# Altium footprint library Connector Header 254.PcbLib: 156 footprints (part 11 of 11)
Each footprint in its own frame and in the unit in brackets; x right, y up, seen from the top. Pads: shape width x height; smd on the part's side, far side on the other; paste and mask are expansions set on the pad; w line width, h text height; cw(c..) or ccw(c..) is an arc to the next point about the centre after c.
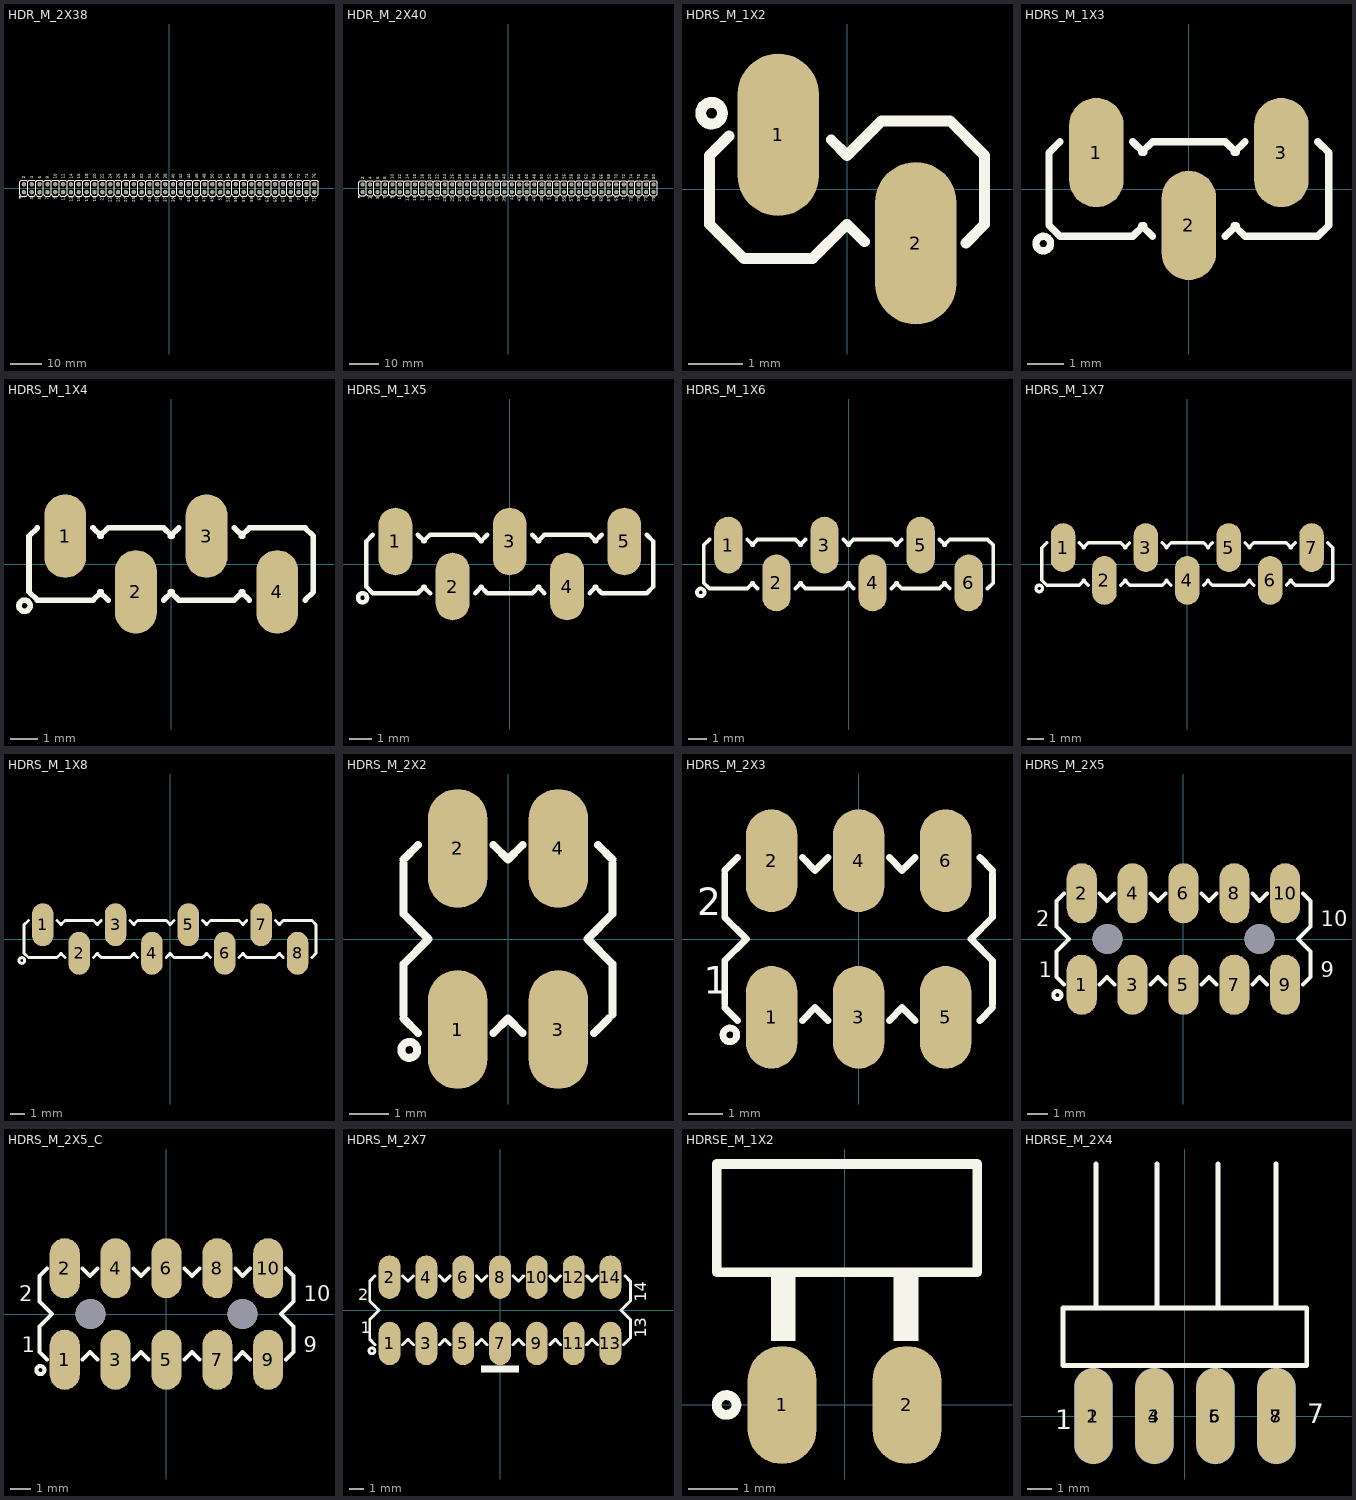
[diagram p10: the footprints below, top view; thin cyan lines are the x and y axes]

## HDR_M_2X38 [mm] "Male Header 2X38 with 2.54 mm Pitch"
pads (76):
  round 1.4 / inner round 1.4 / far side oval 1.4x2.2 hole 1: 1(-46.99,-1.27) 2(-46.99,1.27) 3(-44.45,-1.27) 4(-44.45,1.27) 5(-41.91,-1.27) 6(-41.91,1.27) 7(-39.37,-1.27) 8(-39.37,1.27) 9(-36.83,-1.27) 10(-36.83,1.27) 11(-34.29,-1.27) 12(-34.29,1.27) 13(-31.75,-1.27) 14(-31.75,1.27) 15(-29.21,-1.27) 16(-29.21,1.27) 17(-26.67,-1.27) 18(-26.67,1.27) 19(-24.13,-1.27) 20(-24.13,1.27) 21(-21.59,-1.27) 22(-21.59,1.27) 23(-19.05,-1.27) 24(-19.05,1.27) 25(-16.51,-1.27) 26(-16.51,1.27) 27(-13.97,-1.27) 28(-13.97,1.27) 29(-11.43,-1.27) 30(-11.43,1.27) 31(-8.89,-1.27) 32(-8.89,1.27) 33(-6.35,-1.27) 34(-6.35,1.27) 35(-3.81,-1.27) 36(-3.81,1.27) 37(-1.27,-1.27) 38(-1.27,1.27) 39(1.27,-1.27) 40(1.27,1.27) 41(3.81,-1.27) 42(3.81,1.27) 43(6.35,-1.27) 44(6.35,1.27) 45(8.89,-1.27) 46(8.89,1.27) 47(11.43,-1.27) 48(11.43,1.27) 49(13.97,-1.27) 50(13.97,1.27) 51(16.51,-1.27) 52(16.51,1.27) 53(19.05,-1.27) 54(19.05,1.27) 55(21.59,-1.27) 56(21.59,1.27) 57(24.13,-1.27) 58(24.13,1.27) 59(26.67,-1.27) 60(26.67,1.27) 61(29.21,-1.27) 62(29.21,1.27) 63(31.75,-1.27) 64(31.75,1.27) 65(34.29,-1.27) 66(34.29,1.27) 67(36.83,-1.27) 68(36.83,1.27) 69(39.37,-1.27) 70(39.37,1.27) 71(41.91,-1.27) 72(41.91,1.27) 73(44.45,-1.27) 74(44.45,1.27) 75(46.99,-1.27) 76(46.99,1.27)
TopOverlay:
  drawing of 268 lines, arcs and shapes, not listed
  text "1" at -46.482,-3.253 h1
  text "2" at -46.482,3.048 h1
  text "2" at -46.482,3.048 h1
  text "1" at -46.482,-3.253 h1
  text "4" at -43.942,3.048 h1
  text "3" at -43.942,-3.682 h1
  text "6" at -41.402,3.048 h1
  text "5" at -41.402,-3.682 h1
  text "8" at -38.862,3.048 h1
  text "7" at -38.862,-3.682 h1
  text "10" at -36.322,3.048 h1
  text "9" at -36.322,-3.634 h1
  text "12" at -33.782,3.048 h1
  text "11" at -33.782,-3.986 h1
  text "14" at -31.242,3.048 h1
  text "13" at -31.242,-4.415 h1
  text "16" at -28.702,3.048 h1
  text "15" at -28.702,-4.415 h1
  text "18" at -26.162,3.048 h1
  text "17" at -26.162,-4.415 h1
  text "20" at -23.622,3.048 h1
  text "19" at -23.622,-4.367 h1
  text "22" at -21.082,3.048 h1
  text "21" at -21.082,-4.144 h1
  text "24" at -18.542,3.048 h1
  text "23" at -18.542,-4.572 h1
  text "26" at -16.002,3.048 h1
  text "25" at -16.002,-4.572 h1
  text "28" at -13.462,3.048 h1
  text "27" at -13.462,-4.572 h1
  text "30" at -10.922,3.048 h1
  text "29" at -10.922,-4.524 h1
  text "32" at -8.382,3.048 h1
  text "31" at -8.382,-4.144 h1
  text "34" at -5.842,3.048 h1
  text "33" at -5.842,-4.572 h1
  text "36" at -3.302,3.048 h1
  text "35" at -3.302,-4.572 h1
  text "38" at -0.762,3.048 h1
  text "37" at -0.762,-4.572 h1
  text "40" at 1.778,3.048 h1
  text "39" at 1.778,-4.524 h1
  text "42" at 4.318,3.048 h1
  text "41" at 4.318,-4.144 h1
  text "44" at 6.858,3.048 h1
  text "43" at 6.858,-4.572 h1
  text "46" at 9.398,3.048 h1
  text "45" at 9.398,-4.572 h1
  text "48" at 11.938,3.048 h1
  text "47" at 11.938,-4.572 h1
  text "50" at 14.478,3.048 h1
  text "49" at 14.478,-4.524 h1
  text "52" at 17.018,3.048 h1
  text "51" at 17.018,-4.144 h1
  text "54" at 19.558,3.048 h1
  text "53" at 19.558,-4.572 h1
  text "56" at 22.098,3.048 h1
  text "55" at 22.098,-4.572 h1
  text "58" at 24.638,3.048 h1
  text "57" at 24.638,-4.572 h1
  text "60" at 27.178,3.048 h1
  text "59" at 27.178,-4.524 h1
  text "62" at 29.718,3.048 h1
  text "61" at 29.718,-4.091 h1
  text "64" at 32.258,3.048 h1
  text "63" at 32.258,-4.52 h1
  text "66" at 34.798,3.048 h1
  text "65" at 34.798,-4.52 h1
  text "68" at 37.338,3.048 h1
  text "67" at 37.338,-4.52 h1
  text "70" at 39.878,3.048 h1
  text "69" at 39.878,-4.472 h1
  text "72" at 42.418,3.048 h1
  text "71" at 42.418,-4.144 h1
  text "74" at 44.958,3.048 h1
  text "73" at 44.958,-4.572 h1
  text "76" at 47.498,3.048 h1
  text "75" at 47.498,-4.572 h1
3D body "PIN.STEP": height 8.43, standoff -2.49, extent -48.26,-2.54 -45.72,0
3D body "PIN_mid.STEP": height 8.43, standoff -2.49, extent -43.18,0 -40.64,2.54
3D body "PIN_mid.STEP": height 8.43, standoff -2.49, extent -40.64,0 -38.1,2.54
3D body "PIN_mid.STEP": height 8.43, standoff -2.49, extent -38.1,0 -35.56,2.54
3D body "PIN_mid.STEP": height 8.43, standoff -2.49, extent -35.56,0 -33.02,2.54
3D body "PIN_mid.STEP": height 8.43, standoff -2.49, extent -33.02,0 -30.48,2.54
3D body "PIN_mid.STEP": height 8.43, standoff -2.49, extent -30.48,0 -27.94,2.54
3D body "PIN_mid.STEP": height 8.43, standoff -2.49, extent -27.94,0 -25.4,2.54
3D body "PIN_mid.STEP": height 8.43, standoff -2.49, extent -25.4,0 -22.86,2.54
3D body "PIN_mid.STEP": height 8.43, standoff -2.49, extent -22.86,0 -20.32,2.54
3D body "PIN_mid.STEP": height 8.43, standoff -2.49, extent -20.32,0 -17.78,2.54
3D body "PIN_mid.STEP": height 8.43, standoff -2.49, extent -17.78,0 -15.24,2.54
3D body "PIN_mid.STEP": height 8.43, standoff -2.49, extent -15.24,0 -12.7,2.54
3D body "PIN_mid.STEP": height 8.43, standoff -2.49, extent -12.7,0 -10.16,2.54
3D body "PIN_mid.STEP": height 8.43, standoff -2.49, extent -10.16,0 -7.62,2.54
3D body "PIN_mid.STEP": height 8.43, standoff -2.49, extent -7.62,0 -5.08,2.54
3D body "PIN_mid.STEP": height 8.43, standoff -2.49, extent -5.08,0 -2.54,2.54
3D body "PIN_mid.STEP": height 8.43, standoff -2.49, extent -2.54,0 0,2.54
3D body "PIN_mid.STEP": height 8.43, standoff -2.49, extent 0,0 2.54,2.54
3D body "PIN_mid.STEP": height 8.43, standoff -2.49, extent 2.54,0 5.08,2.54
3D body "PIN_mid.STEP": height 8.43, standoff -2.49, extent 5.08,0 7.62,2.54
3D body "PIN_mid.STEP": height 8.43, standoff -2.49, extent 7.62,0 10.16,2.54
3D body "PIN_mid.STEP": height 8.43, standoff -2.49, extent 10.16,0 12.7,2.54
3D body "PIN_mid.STEP": height 8.43, standoff -2.49, extent 12.7,0 15.24,2.54
3D body "PIN_mid.STEP": height 8.43, standoff -2.49, extent 15.24,0 17.78,2.54
3D body "PIN_mid.STEP": height 8.43, standoff -2.49, extent 17.78,0 20.32,2.54
3D body "PIN_mid.STEP": height 8.43, standoff -2.49, extent 20.32,0 22.86,2.54
3D body "PIN_mid.STEP": height 8.43, standoff -2.49, extent 22.86,0 25.4,2.54
3D body "PIN_mid.STEP": height 8.43, standoff -2.49, extent 25.4,0 27.94,2.54
3D body "PIN_mid.STEP": height 8.43, standoff -2.49, extent 27.94,0 30.48,2.54
3D body "PIN_mid.STEP": height 8.43, standoff -2.49, extent 30.48,0 33.02,2.54
3D body "PIN_mid.STEP": height 8.43, standoff -2.49, extent 33.02,0 35.56,2.54
3D body "PIN_mid.STEP": height 8.43, standoff -2.49, extent 35.56,0 38.1,2.54
3D body "PIN_mid.STEP": height 8.43, standoff -2.49, extent 38.1,0 40.64,2.54
3D body "PIN_mid.STEP": height 8.43, standoff -2.49, extent 40.64,0 43.18,2.54
3D body "PIN_mid.STEP": height 8.43, standoff -2.49, extent 43.18,0 45.72,2.54
3D body "PIN_mid.STEP": height 8.43, standoff -2.49, extent -45.72,0 -43.18,2.54
3D body "PIN_mid.STEP": height 8.43, standoff -2.49, extent -45.72,-2.54 -43.18,0
3D body "PIN_mid.STEP": height 8.43, standoff -2.49, extent -43.18,-2.54 -40.64,0
3D body "PIN_mid.STEP": height 8.43, standoff -2.49, extent -40.64,-2.54 -38.1,0
3D body "PIN_mid.STEP": height 8.43, standoff -2.49, extent -38.1,-2.54 -35.56,0
3D body "PIN_mid.STEP": height 8.43, standoff -2.49, extent -35.56,-2.54 -33.02,0
3D body "PIN_mid.STEP": height 8.43, standoff -2.49, extent -33.02,-2.54 -30.48,0
3D body "PIN_mid.STEP": height 8.43, standoff -2.49, extent -30.48,-2.54 -27.94,0
3D body "PIN_mid.STEP": height 8.43, standoff -2.49, extent -27.94,-2.54 -25.4,0
3D body "PIN_mid.STEP": height 8.43, standoff -2.49, extent -25.4,-2.54 -22.86,0
3D body "PIN_mid.STEP": height 8.43, standoff -2.49, extent -22.86,-2.54 -20.32,0
3D body "PIN_mid.STEP": height 8.43, standoff -2.49, extent -20.32,-2.54 -17.78,0
3D body "PIN_mid.STEP": height 8.43, standoff -2.49, extent -17.78,-2.54 -15.24,0
3D body "PIN_mid.STEP": height 8.43, standoff -2.49, extent -15.24,-2.54 -12.7,0
3D body "PIN_mid.STEP": height 8.43, standoff -2.49, extent -12.7,-2.54 -10.16,0
3D body "PIN_mid.STEP": height 8.43, standoff -2.49, extent -10.16,-2.54 -7.62,0
3D body "PIN_mid.STEP": height 8.43, standoff -2.49, extent -7.62,-2.54 -5.08,0
3D body "PIN_mid.STEP": height 8.43, standoff -2.49, extent -5.08,-2.54 -2.54,0
3D body "PIN_mid.STEP": height 8.43, standoff -2.49, extent -2.54,-2.54 0,0
3D body "PIN_mid.STEP": height 8.43, standoff -2.49, extent 0,-2.54 2.54,0
3D body "PIN_mid.STEP": height 8.43, standoff -2.49, extent 2.54,-2.54 5.08,0
3D body "PIN_mid.STEP": height 8.43, standoff -2.49, extent 5.08,-2.54 7.62,0
3D body "PIN_mid.STEP": height 8.43, standoff -2.49, extent 7.62,-2.54 10.16,0
3D body "PIN_mid.STEP": height 8.43, standoff -2.49, extent 10.16,-2.54 12.7,0
3D body "PIN_mid.STEP": height 8.43, standoff -2.49, extent 12.7,-2.54 15.24,0
3D body "PIN_mid.STEP": height 8.43, standoff -2.49, extent 15.24,-2.54 17.78,0
3D body "PIN_mid.STEP": height 8.43, standoff -2.49, extent 17.78,-2.54 20.32,0
3D body "PIN_mid.STEP": height 8.43, standoff -2.49, extent 20.32,-2.54 22.86,0
3D body "PIN_mid.STEP": height 8.43, standoff -2.49, extent 22.86,-2.54 25.4,0
3D body "PIN_mid.STEP": height 8.43, standoff -2.49, extent 25.4,-2.54 27.94,0
3D body "PIN_mid.STEP": height 8.43, standoff -2.49, extent 27.94,-2.54 30.48,0
3D body "PIN_mid.STEP": height 8.43, standoff -2.49, extent 30.48,-2.54 33.02,0
3D body "PIN_mid.STEP": height 8.43, standoff -2.49, extent 33.02,-2.54 35.56,0
3D body "PIN_mid.STEP": height 8.43, standoff -2.49, extent 35.56,-2.54 38.1,0
3D body "PIN_mid.STEP": height 8.43, standoff -2.49, extent 38.1,-2.54 40.64,0
3D body "PIN_mid.STEP": height 8.43, standoff -2.49, extent 40.64,-2.54 43.18,0
3D body "PIN_mid.STEP": height 8.43, standoff -2.49, extent 43.18,-2.54 45.72,0
3D body "PIN.STEP": height 8.43, standoff -2.49, extent -48.26,0 -45.72,2.54
3D body "PIN.STEP": height 8.43, standoff -2.49, extent 45.72,0 48.26,2.54
3D body "PIN.STEP": height 8.43, standoff -2.49, extent 45.72,-2.54 48.26,0

## HDR_M_2X40 [mm] "Male Header 2X40 with 2.54 mm Pitch"
pads (80):
  round 1.4 / inner round 1.4 / far side oval 1.4x2.2 hole 1: 1(-49.53,-1.27) 2(-49.53,1.27) 3(-46.99,-1.27) 4(-46.99,1.27) 5(-44.45,-1.27) 6(-44.45,1.27) 7(-41.91,-1.27) 8(-41.91,1.27) 9(-39.37,-1.27) 10(-39.37,1.27) 11(-36.83,-1.27) 12(-36.83,1.27) 13(-34.29,-1.27) 14(-34.29,1.27) 15(-31.75,-1.27) 16(-31.75,1.27) 17(-29.21,-1.27) 18(-29.21,1.27) 19(-26.67,-1.27) 20(-26.67,1.27) 21(-24.13,-1.27) 22(-24.13,1.27) 23(-21.59,-1.27) 24(-21.59,1.27) 25(-19.05,-1.27) 26(-19.05,1.27) 27(-16.51,-1.27) 28(-16.51,1.27) 29(-13.97,-1.27) 30(-13.97,1.27) 31(-11.43,-1.27) 32(-11.43,1.27) 33(-8.89,-1.27) 34(-8.89,1.27) 35(-6.35,-1.27) 36(-6.35,1.27) 37(-3.81,-1.27) 38(-3.81,1.27) 39(-1.27,-1.27) 40(-1.27,1.27) 41(1.27,-1.27) 42(1.27,1.27) 43(3.81,-1.27) 44(3.81,1.27) 45(6.35,-1.27) 46(6.35,1.27) 47(8.89,-1.27) 48(8.89,1.27) 49(11.43,-1.27) 50(11.43,1.27) 51(13.97,-1.27) 52(13.97,1.27) 53(16.51,-1.27) 54(16.51,1.27) 55(19.05,-1.27) 56(19.05,1.27) 57(21.59,-1.27) 58(21.59,1.27) 59(24.13,-1.27) 60(24.13,1.27) 61(26.67,-1.27) 62(26.67,1.27) 63(29.21,-1.27) 64(29.21,1.27) 65(31.75,-1.27) 66(31.75,1.27) 67(34.29,-1.27) 68(34.29,1.27) 69(36.83,-1.27) 70(36.83,1.27) 71(39.37,-1.27) 72(39.37,1.27) 73(41.91,-1.27) 74(41.91,1.27) 75(44.45,-1.27) 76(44.45,1.27) 77(46.99,-1.27) 78(46.99,1.27) 79(49.53,-1.27) 80(49.53,1.27)
TopOverlay:
  drawing of 282 lines, arcs and shapes, not listed
  text "1" at -49.022,-3.253 h1
  text "2" at -49.022,3.048 h1
  text "2" at -49.022,3.048 h1
  text "1" at -49.022,-3.253 h1
  text "4" at -46.482,3.048 h1
  text "3" at -46.482,-3.682 h1
  text "6" at -43.942,3.048 h1
  text "5" at -43.942,-3.682 h1
  text "8" at -41.402,3.048 h1
  text "7" at -41.402,-3.682 h1
  text "10" at -38.862,3.048 h1
  text "9" at -38.862,-3.634 h1
  text "12" at -36.322,3.048 h1
  text "11" at -36.322,-3.986 h1
  text "14" at -33.782,3.048 h1
  text "13" at -33.782,-4.415 h1
  text "16" at -31.242,3.048 h1
  text "15" at -31.242,-4.415 h1
  text "18" at -28.702,3.048 h1
  text "17" at -28.702,-4.415 h1
  text "20" at -26.162,3.048 h1
  text "19" at -26.162,-4.367 h1
  text "22" at -23.622,3.048 h1
  text "21" at -23.622,-4.144 h1
  text "24" at -21.082,3.048 h1
  text "23" at -21.082,-4.572 h1
  text "26" at -18.542,3.048 h1
  text "25" at -18.542,-4.572 h1
  text "28" at -16.002,3.048 h1
  text "27" at -16.002,-4.572 h1
  text "30" at -13.462,3.048 h1
  text "29" at -13.462,-4.524 h1
  text "32" at -10.922,3.048 h1
  text "31" at -10.922,-4.144 h1
  text "34" at -8.382,3.048 h1
  text "33" at -8.382,-4.572 h1
  text "36" at -5.842,3.048 h1
  text "35" at -5.842,-4.572 h1
  text "38" at -3.302,3.048 h1
  text "37" at -3.302,-4.572 h1
  text "40" at -0.762,3.048 h1
  text "39" at -0.762,-4.524 h1
  text "42" at 1.778,3.048 h1
  text "41" at 1.778,-4.144 h1
  text "44" at 4.318,3.048 h1
  text "43" at 4.318,-4.572 h1
  text "46" at 6.858,3.048 h1
  text "45" at 6.858,-4.572 h1
  text "48" at 9.398,3.048 h1
  text "47" at 9.398,-4.572 h1
  text "50" at 11.938,3.048 h1
  text "49" at 11.938,-4.524 h1
  text "52" at 14.478,3.048 h1
  text "51" at 14.478,-4.144 h1
  text "54" at 17.018,3.048 h1
  text "53" at 17.018,-4.572 h1
  text "56" at 19.558,3.048 h1
  text "55" at 19.558,-4.572 h1
  text "58" at 22.098,3.048 h1
  text "57" at 22.098,-4.572 h1
  text "60" at 24.638,3.048 h1
  text "59" at 24.638,-4.524 h1
  text "62" at 27.178,3.048 h1
  text "61" at 27.178,-4.091 h1
  text "64" at 29.718,3.048 h1
  text "63" at 29.718,-4.52 h1
  text "66" at 32.258,3.048 h1
  text "65" at 32.258,-4.52 h1
  text "68" at 34.798,3.048 h1
  text "67" at 34.798,-4.52 h1
  text "70" at 37.338,3.048 h1
  text "69" at 37.338,-4.472 h1
  text "72" at 39.878,3.048 h1
  text "71" at 39.878,-4.144 h1
  text "74" at 42.418,3.048 h1
  text "73" at 42.418,-4.572 h1
  text "76" at 44.958,3.048 h1
  text "75" at 44.958,-4.572 h1
  text "78" at 47.498,3.048 h1
  text "77" at 47.498,-4.572 h1
  text "80" at 50.038,3.048 h1
  text "79" at 50.038,-4.524 h1
3D body "PIN.STEP": height 8.43, standoff -2.49, extent -50.8,-2.54 -48.26,0
3D body "PIN_mid.STEP": height 8.43, standoff -2.49, extent -45.72,0 -43.18,2.54
3D body "PIN_mid.STEP": height 8.43, standoff -2.49, extent -43.18,0 -40.64,2.54
3D body "PIN_mid.STEP": height 8.43, standoff -2.49, extent -40.64,0 -38.1,2.54
3D body "PIN_mid.STEP": height 8.43, standoff -2.49, extent -38.1,0 -35.56,2.54
3D body "PIN_mid.STEP": height 8.43, standoff -2.49, extent -35.56,0 -33.02,2.54
3D body "PIN_mid.STEP": height 8.43, standoff -2.49, extent -33.02,0 -30.48,2.54
3D body "PIN_mid.STEP": height 8.43, standoff -2.49, extent -30.48,0 -27.94,2.54
3D body "PIN_mid.STEP": height 8.43, standoff -2.49, extent -27.94,0 -25.4,2.54
3D body "PIN_mid.STEP": height 8.43, standoff -2.49, extent -25.4,0 -22.86,2.54
3D body "PIN_mid.STEP": height 8.43, standoff -2.49, extent -22.86,0 -20.32,2.54
3D body "PIN_mid.STEP": height 8.43, standoff -2.49, extent -20.32,0 -17.78,2.54
3D body "PIN_mid.STEP": height 8.43, standoff -2.49, extent -17.78,0 -15.24,2.54
3D body "PIN_mid.STEP": height 8.43, standoff -2.49, extent -15.24,0 -12.7,2.54
3D body "PIN_mid.STEP": height 8.43, standoff -2.49, extent -12.7,0 -10.16,2.54
3D body "PIN_mid.STEP": height 8.43, standoff -2.49, extent -10.16,0 -7.62,2.54
3D body "PIN_mid.STEP": height 8.43, standoff -2.49, extent -7.62,0 -5.08,2.54
3D body "PIN_mid.STEP": height 8.43, standoff -2.49, extent -5.08,0 -2.54,2.54
3D body "PIN_mid.STEP": height 8.43, standoff -2.49, extent -2.54,0 0,2.54
3D body "PIN_mid.STEP": height 8.43, standoff -2.49, extent 0,0 2.54,2.54
3D body "PIN_mid.STEP": height 8.43, standoff -2.49, extent 2.54,0 5.08,2.54
3D body "PIN_mid.STEP": height 8.43, standoff -2.49, extent 5.08,0 7.62,2.54
3D body "PIN_mid.STEP": height 8.43, standoff -2.49, extent 7.62,0 10.16,2.54
3D body "PIN_mid.STEP": height 8.43, standoff -2.49, extent 10.16,0 12.7,2.54
3D body "PIN_mid.STEP": height 8.43, standoff -2.49, extent 12.7,0 15.24,2.54
3D body "PIN_mid.STEP": height 8.43, standoff -2.49, extent 15.24,0 17.78,2.54
3D body "PIN_mid.STEP": height 8.43, standoff -2.49, extent 17.78,0 20.32,2.54
3D body "PIN_mid.STEP": height 8.43, standoff -2.49, extent 20.32,0 22.86,2.54
3D body "PIN_mid.STEP": height 8.43, standoff -2.49, extent 22.86,0 25.4,2.54
3D body "PIN_mid.STEP": height 8.43, standoff -2.49, extent 25.4,0 27.94,2.54
3D body "PIN_mid.STEP": height 8.43, standoff -2.49, extent 27.94,0 30.48,2.54
3D body "PIN_mid.STEP": height 8.43, standoff -2.49, extent 30.48,0 33.02,2.54
3D body "PIN_mid.STEP": height 8.43, standoff -2.49, extent 33.02,0 35.56,2.54
3D body "PIN_mid.STEP": height 8.43, standoff -2.49, extent 35.56,0 38.1,2.54
3D body "PIN_mid.STEP": height 8.43, standoff -2.49, extent 38.1,0 40.64,2.54
3D body "PIN_mid.STEP": height 8.43, standoff -2.49, extent 40.64,0 43.18,2.54
3D body "PIN_mid.STEP": height 8.43, standoff -2.49, extent 43.18,0 45.72,2.54
3D body "PIN_mid.STEP": height 8.43, standoff -2.49, extent 45.72,0 48.26,2.54
3D body "PIN_mid.STEP": height 8.43, standoff -2.49, extent -48.26,0 -45.72,2.54
3D body "PIN_mid.STEP": height 8.43, standoff -2.49, extent -48.26,-2.54 -45.72,0
3D body "PIN_mid.STEP": height 8.43, standoff -2.49, extent -45.72,-2.54 -43.18,0
3D body "PIN_mid.STEP": height 8.43, standoff -2.49, extent -43.18,-2.54 -40.64,0
3D body "PIN_mid.STEP": height 8.43, standoff -2.49, extent -40.64,-2.54 -38.1,0
3D body "PIN_mid.STEP": height 8.43, standoff -2.49, extent -38.1,-2.54 -35.56,0
3D body "PIN_mid.STEP": height 8.43, standoff -2.49, extent -35.56,-2.54 -33.02,0
3D body "PIN_mid.STEP": height 8.43, standoff -2.49, extent -33.02,-2.54 -30.48,0
3D body "PIN_mid.STEP": height 8.43, standoff -2.49, extent -30.48,-2.54 -27.94,0
3D body "PIN_mid.STEP": height 8.43, standoff -2.49, extent -27.94,-2.54 -25.4,0
3D body "PIN_mid.STEP": height 8.43, standoff -2.49, extent -25.4,-2.54 -22.86,0
3D body "PIN_mid.STEP": height 8.43, standoff -2.49, extent -22.86,-2.54 -20.32,0
3D body "PIN_mid.STEP": height 8.43, standoff -2.49, extent -20.32,-2.54 -17.78,0
3D body "PIN_mid.STEP": height 8.43, standoff -2.49, extent -17.78,-2.54 -15.24,0
3D body "PIN_mid.STEP": height 8.43, standoff -2.49, extent -15.24,-2.54 -12.7,0
3D body "PIN_mid.STEP": height 8.43, standoff -2.49, extent -12.7,-2.54 -10.16,0
3D body "PIN_mid.STEP": height 8.43, standoff -2.49, extent -10.16,-2.54 -7.62,0
3D body "PIN_mid.STEP": height 8.43, standoff -2.49, extent -7.62,-2.54 -5.08,0
3D body "PIN_mid.STEP": height 8.43, standoff -2.49, extent -5.08,-2.54 -2.54,0
3D body "PIN_mid.STEP": height 8.43, standoff -2.49, extent -2.54,-2.54 0,0
3D body "PIN_mid.STEP": height 8.43, standoff -2.49, extent 0,-2.54 2.54,0
3D body "PIN_mid.STEP": height 8.43, standoff -2.49, extent 2.54,-2.54 5.08,0
3D body "PIN_mid.STEP": height 8.43, standoff -2.49, extent 5.08,-2.54 7.62,0
3D body "PIN_mid.STEP": height 8.43, standoff -2.49, extent 7.62,-2.54 10.16,0
3D body "PIN_mid.STEP": height 8.43, standoff -2.49, extent 10.16,-2.54 12.7,0
3D body "PIN_mid.STEP": height 8.43, standoff -2.49, extent 12.7,-2.54 15.24,0
3D body "PIN_mid.STEP": height 8.43, standoff -2.49, extent 15.24,-2.54 17.78,0
3D body "PIN_mid.STEP": height 8.43, standoff -2.49, extent 17.78,-2.54 20.32,0
3D body "PIN_mid.STEP": height 8.43, standoff -2.49, extent 20.32,-2.54 22.86,0
3D body "PIN_mid.STEP": height 8.43, standoff -2.49, extent 22.86,-2.54 25.4,0
3D body "PIN_mid.STEP": height 8.43, standoff -2.49, extent 25.4,-2.54 27.94,0
3D body "PIN_mid.STEP": height 8.43, standoff -2.49, extent 27.94,-2.54 30.48,0
3D body "PIN_mid.STEP": height 8.43, standoff -2.49, extent 30.48,-2.54 33.02,0
3D body "PIN_mid.STEP": height 8.43, standoff -2.49, extent 33.02,-2.54 35.56,0
3D body "PIN_mid.STEP": height 8.43, standoff -2.49, extent 35.56,-2.54 38.1,0
3D body "PIN_mid.STEP": height 8.43, standoff -2.49, extent 38.1,-2.54 40.64,0
3D body "PIN_mid.STEP": height 8.43, standoff -2.49, extent 40.64,-2.54 43.18,0
3D body "PIN_mid.STEP": height 8.43, standoff -2.49, extent 43.18,-2.54 45.72,0
3D body "PIN_mid.STEP": height 8.43, standoff -2.49, extent 45.72,-2.54 48.26,0
3D body "PIN.STEP": height 8.43, standoff -2.49, extent -50.8,0 -48.26,2.54
3D body "PIN.STEP": height 8.43, standoff -2.49, extent 48.26,0 50.8,2.54
3D body "PIN.STEP": height 8.43, standoff -2.49, extent 48.26,-2.54 50.8,0

## HDRS_M_1X2 [mm]
pads (2):
  oval 1.5x3 smd: 1(-1.27,1) 2(1.27,-1)
TopOverlay:
  circle w0.2: c-2.5,1.4 r0.2
  lines w0.2: -2.18,0.98 -2.54,0.619 -2.54,-0.651 -1.905,-1.286 -0.635,-1.286 0,-0.651 0.325,-0.975 ; -0.29,0.91 0,0.619 0.635,1.254 1.905,1.254 2.54,0.619 2.54,-0.651 2.195,-0.995

## HDRS_M_1X3 [mm] "Connector; Header; 3 Position, SMD"
pads (3):
  oval 1.5x3 smd: 1(-2.54,1) 2(0,-1) 3(2.54,1)
TopOverlay:
  circle w0.2: c-4,-1.5 r0.2
  lines w0.2: -3.54,1.3 -3.84,1 -3.84,-1 -3.54,-1.3 -1.54,-1.3 -1.24,-1 ; -1.54,1.3 -1.24,1 ; -1.3,-1 -1,-1.3 ; -1.3,1 -1,1.3 1,1.3 1.3,1 ; 1,-1.3 1.3,-1 ; 1.24,-1 1.54,-1.3 3.54,-1.3 3.84,-1 3.84,1 3.54,1.3 ; 1.24,1 1.54,1.3
3D body "HEADER1X3SMD.stp": height 9.68, standoff 0.03, extent -3.81,-2.4 3.81,2.4

## HDRS_M_1X4 [mm] "Connector; Header; 4 Position, SMD"
pads (4):
  oval 1.5x3 smd: 1(-3.81,1) 2(-1.27,-1) 3(1.27,1) 4(3.81,-1)
TopOverlay:
  circle w0.2: c-5.27,-1.5 r0.2
  lines w0.2: -4.81,1.3 -5.11,1 -5.11,-1 -4.81,-1.3 -2.81,-1.3 -2.51,-1 ; -2.81,1.3 -2.51,1 ; -2.57,-1 -2.27,-1.3 ; -2.57,1 -2.27,1.3 -0.27,1.3 0.03,1 ; -0.27,-1.3 0.03,-1 ; -0.03,-1 0.27,-1.3 2.27,-1.3 2.57,-1 ; -0.03,1 0.27,1.3 ; 2.27,1.3 2.57,1 ; 2.51,-1 2.81,-1.3 ; 2.51,1 2.81,1.3 4.81,1.3 5.11,1 5.11,-1 4.81,-1.3
3D body "HEADER1X3SMD.stp": height 9.68, standoff 0.03, extent -5.08,-2.4 2.54,2.4
3D body "HEADER1X3SMD.stp": height 9.68, standoff 0.03, extent -2.54,-2.4 5.08,2.4

## HDRS_M_1X5 [mm] "Connector; Header; 5 Position, SMD"
pads (5):
  oval 1.5x3 smd: 1(-5.08,1) 2(-2.54,-1) 3(0,1) 4(2.54,-1) 5(5.08,1)
TopOverlay:
  circle w0.2: c-6.54,-1.5 r0.2
  lines w0.2: -6.08,1.3 -6.38,1 -6.38,-1 -6.08,-1.3 -4.08,-1.3 -3.78,-1 ; -4.08,1.3 -3.78,1 ; -3.84,-1 -3.54,-1.3 ; -3.84,1 -3.54,1.3 -1.54,1.3 -1.24,1 ; -1.54,-1.3 -1.24,-1 ; -1.3,-1 -1,-1.3 1,-1.3 1.3,-1 ; -1.3,1 -1,1.3 ; 1,1.3 1.3,1 ; 1.24,-1 1.54,-1.3 ; 1.24,1 1.54,1.3 3.54,1.3 3.84,1 ; 3.54,-1.3 3.84,-1 ; 3.78,-1 4.08,-1.3 6.08,-1.3 6.38,-1 6.38,1 6.08,1.3 ; 3.78,1 4.08,1.3
3D body "HEADER1X3SMD.stp": height 9.68, standoff 0.03, extent -1.27,-2.4 6.35,2.4
3D body "HEADER1X3SMD.stp": height 9.68, standoff 0.03, extent -6.35,-2.4 1.27,2.4
3D body "HEADER1X3SMD.stp": height 9.68, standoff 0.03, extent -3.81,-2.4 3.81,2.4

## HDRS_M_1X6 [mm] "Connector; Header; 6 Position, SMD"
pads (6):
  oval 1.5x3 smd: 1(-6.35,1) 2(-3.81,-1) 3(-1.27,1) 4(1.27,-1) 5(3.81,1) 6(6.35,-1)
TopOverlay:
  circle w0.2: c-7.81,-1.5 r0.2
  lines w0.2: -7.35,1.3 -7.65,1 -7.65,-1 -7.35,-1.3 -5.35,-1.3 -5.05,-1 ; -5.35,1.3 -5.05,1 ; -5.11,-1 -4.81,-1.3 ; -5.11,1 -4.81,1.3 -2.81,1.3 -2.51,1 ; -2.81,-1.3 -2.51,-1 ; -2.57,-1 -2.27,-1.3 -0.27,-1.3 0.03,-1 ; -2.57,1 -2.27,1.3 ; -0.27,1.3 0.03,1 ; -0.03,-1 0.27,-1.3 ; -0.03,1 0.27,1.3 2.27,1.3 2.57,1 ; 2.27,-1.3 2.57,-1 ; 2.51,-1 2.81,-1.3 4.81,-1.3 5.11,-1 ; 2.51,1 2.81,1.3 ; 4.81,1.3 5.11,1 ; 5.05,-1 5.35,-1.3 ; 5.05,1 5.35,1.3 7.35,1.3 7.65,1 7.65,-1 7.35,-1.3
3D body "HEADER1X3SMD.stp": height 9.68, standoff 0.03, extent 0,-2.4 7.62,2.4
3D body "HEADER1X3SMD.stp": height 9.68, standoff 0.03, extent -7.62,-2.4 0,2.4

## HDRS_M_1X7 [mm] "Connector; Header; 7 Position, SMD"
pads (7):
  oval 1.5x3 smd: 1(-7.62,1) 2(-5.08,-1) 3(-2.54,1) 4(0,-1) 5(2.54,1) 6(5.08,-1) 7(7.62,1)
TopOverlay:
  circle w0.2: c-9.08,-1.5 r0.2
  lines w0.2: -8.62,1.3 -8.92,1 -8.92,-1 -8.62,-1.3 -6.62,-1.3 -6.32,-1 ; -6.62,1.3 -6.32,1 ; -6.38,-1 -6.08,-1.3 ; -6.38,1 -6.08,1.3 -4.08,1.3 -3.78,1 ; -4.08,-1.3 -3.78,-1 ; -3.84,-1 -3.54,-1.3 -1.54,-1.3 -1.24,-1 ; -3.84,1 -3.54,1.3 ; -1.54,1.3 -1.24,1 ; -1.3,-1 -1,-1.3 ; -1.3,1 -1,1.3 1,1.3 1.3,1 ; 1,-1.3 1.3,-1 ; 1.24,-1 1.54,-1.3 3.54,-1.3 3.84,-1 ; 1.24,1 1.54,1.3 ; 3.54,1.3 3.84,1 ; 3.78,-1 4.08,-1.3 ; 3.78,1 4.08,1.3 6.08,1.3 6.38,1 ; 6.08,-1.3 6.38,-1 ; 6.32,-1 6.62,-1.3 8.62,-1.3 8.92,-1 8.92,1 8.62,1.3 ; 6.32,1 6.62,1.3
3D body "HEADER1X3SMD.stp": height 9.68, standoff 0.03, extent 1.27,-2.4 8.89,2.4
3D body "HEADER1X3SMD.stp": height 9.68, standoff 0.03, extent -1.27,-2.4 6.35,2.4
3D body "HEADER1X3SMD.stp": height 9.68, standoff 0.03, extent -8.89,-2.4 -1.27,2.4

## HDRS_M_1X8 [mm] "Connector; Header; 8 Position, SMD"
pads (8):
  oval 1.5x3 smd: 1(-8.89,1) 2(-6.35,-1) 3(-3.81,1) 4(-1.27,-1) 5(1.27,1) 6(3.81,-1) 7(6.35,1) 8(8.89,-1)
TopOverlay:
  circle w0.2: c-10.35,-1.5 r0.2
  lines w0.2: -9.89,1.3 -10.19,1 -10.19,-1 -9.89,-1.3 -7.89,-1.3 -7.59,-1 ; -7.89,1.3 -7.59,1 ; -7.65,-1 -7.35,-1.3 ; -7.65,1 -7.35,1.3 -5.35,1.3 -5.05,1 ; -5.35,-1.3 -5.05,-1 ; -5.11,-1 -4.81,-1.3 -2.81,-1.3 -2.51,-1 ; -5.11,1 -4.81,1.3 ; -2.81,1.3 -2.51,1 ; -2.57,-1 -2.27,-1.3 ; -2.57,1 -2.27,1.3 -0.27,1.3 0.03,1 ; -0.27,-1.3 0.03,-1 ; -0.03,-1 0.27,-1.3 2.27,-1.3 2.57,-1 ; -0.03,1 0.27,1.3 ; 2.27,1.3 2.57,1 ; 2.51,-1 2.81,-1.3 ; 2.51,1 2.81,1.3 4.81,1.3 5.11,1 ; 4.81,-1.3 5.11,-1 ; 5.05,-1 5.35,-1.3 7.35,-1.3 7.65,-1 ; 5.05,1 5.35,1.3 ; 7.35,1.3 7.65,1 ; 7.59,-1 7.89,-1.3 ; 7.59,1 7.89,1.3 9.89,1.3 10.19,1 10.19,-1 9.89,-1.3
3D body "HEADER1X3SMD.stp": height 9.68, standoff 0.03, extent -10.16,-2.4 -2.54,2.4
3D body "HEADER1X3SMD.stp": height 9.68, standoff 0.03, extent -7.62,-2.4 0,2.4
3D body "HEADER1X3SMD.stp": height 9.68, standoff 0.03, extent 0,-2.4 7.62,2.4
3D body "HEADER1X3SMD.stp": height 9.68, standoff 0.03, extent 2.54,-2.4 10.16,2.4

## HDRS_M_2X2 [mm]
pads (4):
  oval 1.5x3 smd: 1(-1.27,-2.286) 2(-1.27,2.286) 3(1.27,-2.286) 4(1.27,2.286)
TopOverlay:
  circle w0.2: c-2.49,-2.8 r0.2
  lines w0.2: -2.64,-2.005 -2.267,-2.378 ; -2.64,-1.905 -2.64,-0.635 -2.005,0 -2.64,0.635 -2.64,1.905 ; -2.64,2.005 -2.267,2.378 ; -0.373,-2.378 0,-2.005 0.373,-2.378 ; -0.373,2.378 0,2.005 0.373,2.378 ; 2.167,-2.378 2.54,-2.005 ; 2.267,2.378 2.64,2.005 ; 2.64,-1.905 2.64,-0.635 2.005,0 2.64,0.635 2.64,1.905
3D body "HEADER2X2SMD.stp": height 9.54, standoff -0.11, extent -2.54,-3.492 2.54,3.493

## HDRS_M_2X3 [mm] "Connector; Header; 3x2 Position, SMD"
pads (6):
  oval 1.5x3 smd: 1(-2.54,-2.286) 2(-2.54,2.286) 3(0,-2.286) 4(0,2.286) 5(2.54,-2.286) 6(2.54,2.286)
TopOverlay:
  circle w0.2: c-3.76,-2.8 r0.2
  lines w0.2: -3.91,-2.005 -3.537,-2.378 ; -3.91,-1.905 -3.91,-0.635 -3.275,0 -3.91,0.635 -3.91,1.905 ; -3.91,2.005 -3.537,2.378 ; -1.643,-2.378 -1.27,-2.005 -0.897,-2.378 ; -1.643,2.378 -1.27,2.005 -0.897,2.378 ; 0.897,-2.378 1.27,-2.005 1.643,-2.378 ; 0.897,2.378 1.27,2.005 1.643,2.378 ; 3.537,-2.378 3.91,-2.005 ; 3.537,2.378 3.91,2.005 ; 3.91,-1.905 3.91,-0.635 3.275,0 3.91,0.635 3.91,1.905
  text "1" at -4.52,-1.6 h0.8
  text "2" at -4.72,0.7 h0.8
3D body "HEADER2X3SMD.stp": height 9.54, standoff -0.11, extent -3.81,-3.492 3.81,3.493

## HDRS_M_2X5 [mm] "Male Header 2X05 with 2.54 mm SMD, TSM-105-01-X-DV-A"
pads (12):
  oval 1.5x3 smd: 1(-5.08,-2.286) 2(-5.08,2.286) 3(-2.54,-2.286) 4(-2.54,2.286) 5(0,-2.286) 6(0,2.286) 7(2.54,-2.286) 8(2.54,2.286) 9(5.08,-2.286) 10(5.08,2.286)
  round 1.5 hole 1.5 unplated mask+0.038: ""(-3.8,0) ""(3.8,0)
TopOverlay:
  circle w0.2: c-6.3,-2.8 r0.2
  lines w0.2: -5.977,-2.278 -6.35,-1.905 -6.35,-0.635 -5.715,0 -6.35,0.635 -6.35,1.905 -5.977,2.278 ; -4.183,-2.278 -3.81,-1.905 -3.437,-2.278 ; -4.183,2.278 -3.81,1.905 -3.437,2.278 ; -1.643,-2.278 -1.27,-1.905 -0.897,-2.278 ; -1.643,2.278 -1.27,1.905 -0.897,2.278 ; 0.897,-2.278 1.27,-1.905 1.643,-2.278 ; 0.897,2.278 1.27,1.905 1.643,2.278 ; 3.437,-2.278 3.81,-1.905 4.183,-2.278 ; 3.437,2.278 3.81,1.905 4.183,2.278 ; 5.977,-2.278 6.35,-1.905 6.35,-0.635 5.715,0 6.35,0.635 6.35,1.905 5.977,2.278
  text "9" at 6.858,-1.905 h0.76
  text "10" at 6.858,0.635 h0.76
  text "1" at -7.239,-1.905 h0.76
  text "2" at -7.366,0.635 h0.76
3D body "TSM-105-01-X-DV-A.STEP": height 9.65, standoff -1.27, extent -6.35,-3.683 6.35,3.683

## HDRS_M_2X5_C [mm] "Male Header 2X05 with 2.54 mm SMD WITH CABLE"
pads (12):
  oval 1.5x3 smd: 1(-5.08,-2.286) 2(-5.08,2.286) 3(-2.54,-2.286) 4(-2.54,2.286) 5(0,-2.286) 6(0,2.286) 7(2.54,-2.286) 8(2.54,2.286) 9(5.08,-2.286) 10(5.08,2.286)
  round 1.5 hole 1.5 unplated mask+0.038: ""(-3.8,0) ""(3.8,0)
TopOverlay:
  circle w0.2: c-6.3,-2.8 r0.2
  lines w0.2: -5.977,-2.278 -6.35,-1.905 -6.35,-0.635 -5.715,0 -6.35,0.635 -6.35,1.905 -5.977,2.278 ; -4.183,-2.278 -3.81,-1.905 -3.437,-2.278 ; -4.183,2.278 -3.81,1.905 -3.437,2.278 ; -1.643,-2.278 -1.27,-1.905 -0.897,-2.278 ; -1.643,2.278 -1.27,1.905 -0.897,2.278 ; 0.897,-2.278 1.27,-1.905 1.643,-2.278 ; 0.897,2.278 1.27,1.905 1.643,2.278 ; 3.437,-2.278 3.81,-1.905 4.183,-2.278 ; 3.437,2.278 3.81,1.905 4.183,2.278 ; 5.977,-2.278 6.35,-1.905 6.35,-0.635 5.715,0 6.35,0.635 6.35,1.905 5.977,2.278
  text "9" at 6.858,-1.905 h0.76
  text "10" at 6.858,0.635 h0.76
  text "1" at -7.239,-1.905 h0.76
  text "2" at -7.366,0.635 h0.76
3D body "10 Pin (2.5 mm Pitch) IDC Connector.stp": height 76.91, standoff 3.91, extent -8.696,-4.133 8.595,4.265
3D body "TSM-105-01-X-DV-A.STEP": height 9.65, standoff -1.27, extent -6.35,-3.683 6.35,3.683

## HDRS_M_2X7 [mm]
pads (14):
  oval 1.5x3 smd: 1(-7.62,-2.286) 2(-7.62,2.286) 3(-5.08,-2.286) 4(-5.08,2.286) 5(-2.54,-2.286) 6(-2.54,2.286) 7(0,-2.286) 8(0,2.286) 9(2.54,-2.286) 10(2.54,2.286) 11(5.08,-2.286) 12(5.08,2.286) 13(7.62,-2.286) 14(7.62,2.286)
TopOverlay:
  circle w0.2: c-8.84,-2.8 r0.2
  rectangle: -1.3,-4.3 1.3,-3.8
  lines w0.2: -8.99,-2.005 -8.617,-2.378 ; -8.99,-1.905 -8.99,-0.635 -8.355,0 -8.99,0.635 -8.99,1.905 ; -8.99,2.005 -8.617,2.378 ; -6.723,-2.378 -6.35,-2.005 -5.977,-2.378 ; -6.723,2.378 -6.35,2.005 -5.977,2.378 ; -4.183,-2.378 -3.81,-2.005 -3.437,-2.378 ; -4.183,2.378 -3.81,2.005 -3.437,2.378 ; -1.643,-2.378 -1.27,-2.005 -0.897,-2.378 ; -1.643,2.378 -1.27,2.005 -0.897,2.378 ; 0.897,-2.378 1.27,-2.005 1.643,-2.378 ; 0.897,2.378 1.27,2.005 1.643,2.378 ; 3.437,-2.378 3.81,-2.005 4.183,-2.378 ; 3.437,2.378 3.81,2.005 4.183,2.378 ; 5.977,-2.378 6.35,-2.005 6.723,-2.378 ; 5.977,2.378 6.35,2.005 6.723,2.378 ; 8.517,-2.378 8.89,-2.005 ; 8.617,2.378 8.99,2.005 ; 8.99,-1.905 8.99,-0.635 8.355,0 8.99,0.635 8.99,1.905
  text "14" at 10.1,0.6 h0.8
  text "13" at 10.1,-1.9 h0.8
  text "2" at -9.8,0.7 h0.8
  text "1" at -9.6,-1.6 h0.8
3D body "HEADER2X7SMD.stp": height 9.54, standoff -0.11, extent -8.89,-3.492 8.89,3.493

## HDRSE_M_1X2 [mm]
pads (2):
  oval 1.4x2.4 smd mask+0.1: 1(-1.27,0) 2(1.27,0)
TopOverlay:
  circle w0.2: c-2.4,0 r0.2
  rectangle: -1.5,1.3 -1,2.7
  region: 1.5,2.7 1,2.7 1,1.3 1.5,1.3
  lines w0.2: -2.6,2.7 2.7,2.7 2.7,4.9 -2.6,4.9 -2.6,2.7
3D body "User Library-Header_Male_2Pin.STEP": height 1.54, standoff -0.94, extent -2.5,-0.47 2.58,11.07

## HDRSE_M_2X4 [mm] "Connector; Header; 4x2 Position, SMD, EDGE of Board"
height 7.01
pads (8):
  oval 1.6x4 smd: 1(-3.81,0) 3(-1.27,0) 5(1.27,0) 7(3.81,0)
  oval 1.6x4 smd far side: 2(-3.81,0) 4(-1.27,0) 6(1.27,0) 8(3.81,0)
TopOverlay:
  lines w0.2: -3.7,4.5 -3.7,10.5 ; -1.16,4.5 -1.16,10.5 ; 1.38,4.5 1.38,10.5 ; 3.8,4.5 3.8,10.5 ; -5.08,2.1 -5.08,4.5 5.08,4.5 5.08,2.1 -5.08,2.1
  text "7" at 5.1,-0.3 h0.8
  text "1" at -5.411,-0.545 h0.8
BottomOverlay:
  text "2" at -4.991,-0.511 h0.8
  text "8" at 5.037,-0.322 h0.8
3D body "User Library-Header_Male_4Pin.STEP": height 1.59, standoff -0.89, extent -5.08,-0.955 5.08,10.585
3D body "User Library-Header_Male_4Pin.STEP": height -0.91, standoff -3.39, extent -5.09,-1 5.07,10.54